# Altium footprint library ubloxLib.PcbLib: 41 footprints (part 1 of 3)
Each footprint in its own frame and in the unit in brackets; x right, y up, seen from the top. Pads: shape width x height; smd on the part's side, far side on the other; paste and mask are expansions set on the pad; w line width, h text height; cw(c..) or ccw(c..) is an arc to the next point about the centre after c.
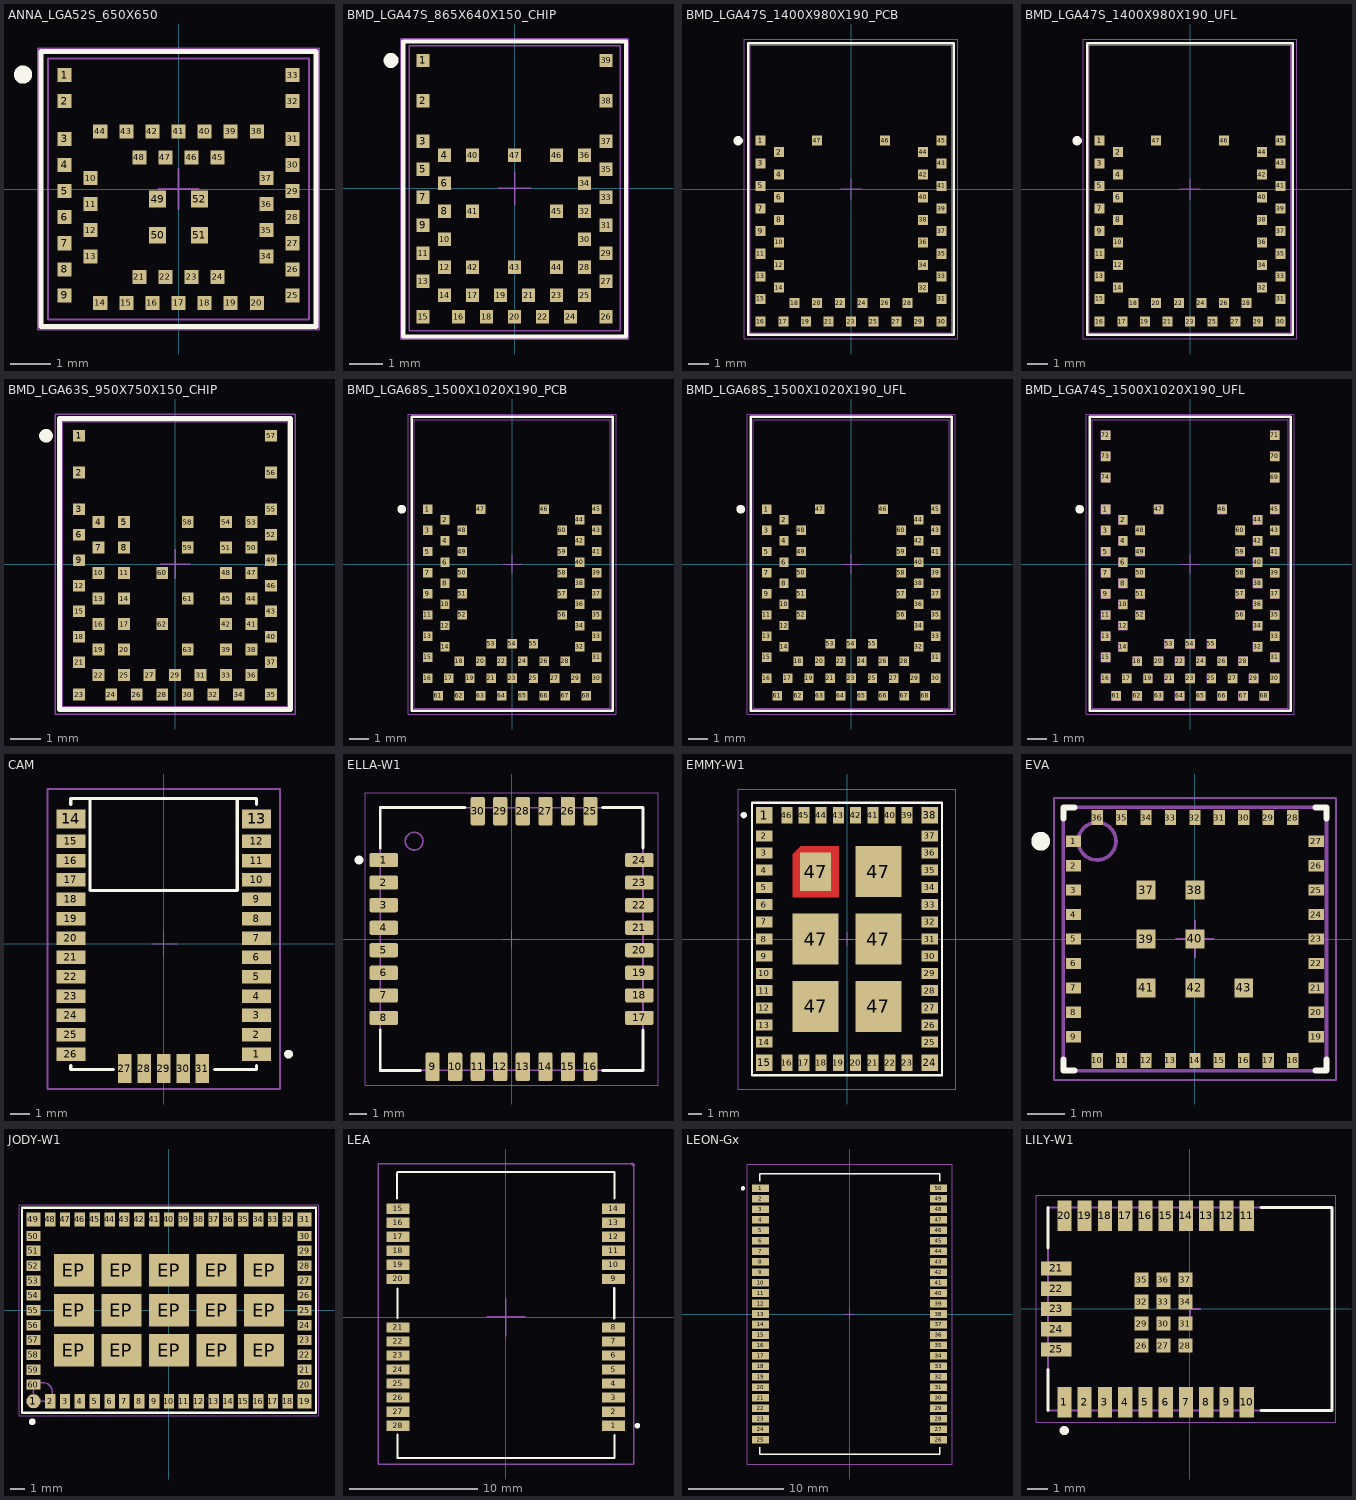
[diagram p0: the footprints below, top view; thin cyan lines are the x and y axes]

## ANNA_LGA52S_650X650 [mm]
pads (52):
  rect 0.35x0.35 smd paste+0 mask+0.05: 1(-2.84,2.84) 2(-2.84,2.19) 3(-2.84,1.248) 4(-2.84,0.598) 5(-2.84,-0.052) 6(-2.84,-0.702) 7(-2.84,-1.352) 8(-2.84,-2.002) 9(-2.84,-2.652) 10(-2.19,0.273) 11(-2.19,-0.377) 12(-2.19,-1.027) 13(-2.19,-1.677) 14(-1.95,-2.84) 15(-1.3,-2.84) 17(0,-2.84) 18(0.65,-2.84) 20(1.95,-2.84) 21(-0.975,-2.19) 23(0.325,-2.19) 24(0.975,-2.19) 25(2.84,-2.652) 26(2.84,-2.002) 27(2.84,-1.352) 28(2.84,-0.702) 29(2.84,-0.052) 30(2.84,0.598) 31(2.84,1.248) 32(2.84,2.19) 33(2.84,2.84) 34(2.19,-1.677) 35(2.19,-1.027) 36(2.19,-0.377) 37(2.19,0.273) 38(1.95,1.435) 39(1.3,1.435) 40(0.65,1.435) 41(0,1.435) 42(-0.65,1.435) 43(-1.3,1.435) 44(-1.95,1.435) 46(0.325,0.785) 48(-0.975,0.785)
  rect 0.35x0.35 smd mask+0.05: 16(-0.65,-2.84) 19(1.3,-2.84) 22(-0.325,-2.19) 45(0.975,0.785) 47(-0.325,0.785)
  rect 0.42x0.42 smd paste+0 mask+0.05: 49(-0.52,-0.252) 50(-0.52,-1.152) 51(0.52,-1.152) 52(0.52,-0.252)
Top Overlay:
  circle w0.254: c-3.875,2.85 r0.1
  lines w0.127: -3.425,-3.425 -2.825,-3.425 3.425,-3.425 3.425,3.425 -3.425,3.425 -3.425,-3.425
Mechanical 13:
  lines w0.05: -3.25,-3.25 -3.25,3.25 3.25,3.25 3.25,-3.25 -3.25,-3.25
Mechanical 15:
  lines w0.05: -0.5,0 0.5,0 ; 0,-0.5 0,0.5 ; -3.5,-3.5 3.5,-3.5 3.5,3.5 -3.5,3.5 -3.5,-3.5
  text ".Designator" at 0.1,0.433 h1
3D body "u-blox_ANNA-B1-LGA52 (STEP-AP214)_1.0.step": height 1.2, standoff 0.05, extent -3.25,-3.25 3.25,3.25

## BMD_LGA47S_865X640X150_CHIP [mm] "LGA, 47pin, 0.8mm Pitch, 8.65mm x 6.4mm"
height 1.5
pads (47):
  rect 0.4x0.4 smd: 1(-2.775,3.875) 2(-2.775,2.65) 3(-2.775,1.425) 4(-2.125,1) 5(-2.775,0.575) 6(-2.125,0.15) 7(-2.775,-0.275) 8(-2.125,-0.7) 9(-2.775,-1.125) 10(-2.125,-1.55) 11(-2.775,-1.975) 12(-2.125,-2.4) 13(-2.775,-2.825) 14(-2.125,-3.25) 15(-2.775,-3.9) 16(-1.7,-3.9) 17(-1.275,-3.25) 18(-0.85,-3.9) 19(-0.425,-3.25) 20(0,-3.9) 21(0.425,-3.25) 22(0.85,-3.9) 23(1.275,-3.25) 24(1.7,-3.9) 25(2.125,-3.25) 26(2.775,-3.9) 27(2.775,-2.825) 28(2.125,-2.4) 29(2.775,-1.975) 30(2.125,-1.55) 31(2.775,-1.125) 32(2.125,-0.7) 33(2.775,-0.275) 34(2.125,0.15) 35(2.775,0.575) 36(2.125,1) 37(2.775,1.425) 38(2.775,2.65) 39(2.775,3.875) 40(-1.275,1) 41(-1.275,-0.7) 42(-1.275,-2.4) 43(0,-2.4) 44(1.275,-2.4) 45(1.275,-0.7) 46(1.275,1) 47(0,1)
Top Overlay:
  circle w0.254: c-3.75,3.875 r0.1
  lines w0.127: -3.375,-4.5 3.375,-4.5 3.375,4.45 -3.375,4.45 -3.375,-4.5
Mechanical 13:
  lines w0.05: -3.2,-4.325 3.2,-4.325 3.2,4.325 -3.2,4.325 -3.2,-4.325
Mechanical 15:
  lines w0.05: -0.5,0 0.5,0 ; 0,-0.5 0,0.5 ; -3.45,-4.575 3.45,-4.575 3.45,4.525 -3.45,4.525 -3.45,-4.575
  text ".Designator" at 0.1,0.433 h1
Multi-Layer:
  pour cut-out: -3.2,4.325 -3.2,4.075 -2.575,4.075 -2.575,1.2 2.425,1.2 2.425,4.075 3.2,4.075 3.2,4.325
3D body "BMD-350.STEP": height 1.54, standoff 0.05, extent -3.2,-4.325 3.2,4.325

## BMD_LGA47S_1400X980X190_PCB [mm] "LGA, 47pin, 1.1mm Pitch, 14mm x 9.8mm"
height 1.9
pads (47):
  rect 0.49x0.49 smd: 1(-4.4,2.35) 2(-3.5,1.8) 3(-4.4,1.25) 4(-3.5,0.7) 5(-4.4,0.15) 6(-3.5,-0.4) 7(-4.4,-0.95) 8(-3.5,-1.5) 9(-4.4,-2.05) 10(-3.5,-2.6) 11(-4.4,-3.15) 12(-3.5,-3.7) 13(-4.4,-4.25) 14(-3.5,-4.8) 15(-4.4,-5.35) 16(-4.4,-6.45) 17(-3.3,-6.45) 18(-2.75,-5.55) 19(-2.2,-6.45) 20(-1.65,-5.55) 21(-1.1,-6.45) 22(-0.55,-5.55) 23(0,-6.45) 24(0.55,-5.55) 25(1.1,-6.45) 26(1.65,-5.55) 27(2.2,-6.45) 28(2.75,-5.55) 29(3.3,-6.45) 30(4.4,-6.45) 31(4.4,-5.35) 32(3.5,-4.8) 33(4.4,-4.25) 34(3.5,-3.7) 35(4.4,-3.15) 36(3.5,-2.6) 37(4.4,-2.05) 38(3.5,-1.5) 39(4.4,-0.95) 40(3.5,-0.4) 41(4.4,0.15) 42(3.5,0.7) 43(4.4,1.25) 44(3.5,1.8) 45(4.4,2.35) 46(1.65,2.35) 47(-1.65,2.35)
Top Overlay:
  circle w0.254: c-5.5,2.35 r0.1
  lines w0.127: -5,-7.1 5,-7.1 5,7.1 -5,7.1 -5,-7.1
Mechanical 13:
  lines w0.05: -4.9,-7 4.9,-7 4.9,7 -4.9,7 -4.9,-7
Mechanical 15:
  lines w0.05: -0.5,0 0.5,0 ; 0,-0.5 0,0.5 ; -5.2,-7.3 5.2,-7.3 5.2,7.3 -5.2,7.3 -5.2,-7.3
  text ".Designator" at 0.1,0.433 h1
Multi-Layer:
  pour cut-out: -4.9,2.6 4.9,2.6 4.9,7 -4.9,7
3D body "BMD-300-330-360.STEP": height 1.86, standoff 0.05, extent -4.9,-7 4.9,7

## BMD_LGA47S_1400X980X190_UFL [mm] "LGA, 47pin, 1.1mm Pitch, 14mm x 9.8mm"
height 1.9
pads (47):
  rect 0.49x0.49 smd: 1(-4.4,2.35) 2(-3.5,1.8) 3(-4.4,1.25) 4(-3.5,0.7) 5(-4.4,0.15) 6(-3.5,-0.4) 7(-4.4,-0.95) 8(-3.5,-1.5) 9(-4.4,-2.05) 10(-3.5,-2.6) 11(-4.4,-3.15) 12(-3.5,-3.7) 13(-4.4,-4.25) 14(-3.5,-4.8) 15(-4.4,-5.35) 16(-4.4,-6.45) 17(-3.3,-6.45) 18(-2.75,-5.55) 19(-2.2,-6.45) 20(-1.65,-5.55) 21(-1.1,-6.45) 22(-0.55,-5.55) 23(0,-6.45) 24(0.55,-5.55) 25(1.1,-6.45) 26(1.65,-5.55) 27(2.2,-6.45) 28(2.75,-5.55) 29(3.3,-6.45) 30(4.4,-6.45) 31(4.4,-5.35) 32(3.5,-4.8) 33(4.4,-4.25) 34(3.5,-3.7) 35(4.4,-3.15) 36(3.5,-2.6) 37(4.4,-2.05) 38(3.5,-1.5) 39(4.4,-0.95) 40(3.5,-0.4) 41(4.4,0.15) 42(3.5,0.7) 43(4.4,1.25) 44(3.5,1.8) 45(4.4,2.35) 46(1.65,2.35) 47(-1.65,2.35)
Top Overlay:
  circle w0.254: c-5.5,2.35 r0.1
  lines w0.127: -5,-7.1 5,-7.1 5,7.1 -5,7.1 -5,-7.1
Mechanical 13:
  lines w0.05: -4.9,-7 4.9,-7 4.9,7 -4.9,7 -4.9,-7
Mechanical 15:
  lines w0.05: -0.5,0 0.5,0 ; 0,-0.5 0,0.5 ; -5.2,-7.3 5.2,-7.3 5.2,7.3 -5.2,7.3 -5.2,-7.3
  text ".Designator" at 0.1,0.433 h1
Multi-Layer:
  pour cut-out: -4.9,2.6 4.9,2.6 4.9,7 -4.9,7
3D body "BMD-301.STEP": height 1.89, standoff 0.05, extent -4.9,-7 4.9,7

## BMD_LGA63S_950X750X150_CHIP [mm] "WLCSP, 63pin, 0.85mm Pitch, 9.5mm x 7.5mm"
height 1.5
pads (63):
  rect 0.39x0.39 smd: 1(-3.2,4.275) 2(-3.2,3.05) 3(-3.2,1.825) 4(-2.55,1.4) 5(-1.7,1.4) 6(-3.2,0.975) 7(-2.55,0.55) 8(-1.7,0.55) 9(-3.2,0.125) 10(-2.55,-0.3) 11(-1.7,-0.3) 12(-3.2,-0.725) 13(-2.55,-1.15) 14(-1.7,-1.15) 15(-3.2,-1.575) 16(-2.55,-2) 17(-1.7,-2) 18(-3.2,-2.425) 19(-2.55,-2.85) 20(-1.7,-2.85) 21(-3.2,-3.275) 22(-2.55,-3.7) 23(-3.2,-4.35) 24(-2.125,-4.35) 25(-1.7,-3.7) 26(-1.275,-4.35) 27(-0.85,-3.7) 28(-0.425,-4.35) 29(0,-3.7) 30(0.425,-4.35) 31(0.85,-3.7) 32(1.275,-4.35) 33(1.7,-3.7) 34(2.125,-4.35) 35(3.2,-4.35) 36(2.55,-3.7) 37(3.2,-3.275) 38(2.55,-2.85) 39(1.7,-2.85) 40(3.2,-2.425) 41(2.55,-2) 42(1.7,-2) 43(3.2,-1.575) 44(2.55,-1.15) 45(1.7,-1.15) 46(3.2,-0.725) 47(2.55,-0.3) 48(1.7,-0.3) 49(3.2,0.125) 50(2.55,0.55) 51(1.7,0.55) 52(3.2,0.975) 53(2.55,1.4) 54(1.7,1.4) 55(3.2,1.825) 56(3.2,3.05) 57(3.2,4.275) 58(0.425,1.4) 59(0.425,0.55) 60(-0.425,-0.3) 61(0.425,-1.15) 62(-0.425,-2) 63(0.425,-2.85)
Top Overlay:
  circle w0.254: c-4.3,4.275 r0.1
  lines w0.152: -3.85,-4.85 3.85,-4.85 3.85,4.85 -3.85,4.85 -3.85,-4.85
Mechanical 13:
  lines w0.05: -3.75,-4.75 -3.75,4.75 3.75,4.75 3.75,-4.75 -3.75,-4.75
Mechanical 15:
  lines w0.05: -0.5,0 0.5,0 ; 0,-0.5 0,0.5 ; -4,-5 -4,5 4,5 4,-5 -4,-5
  text ".Designator" at 0.1,0.433 h1
Multi-Layer:
  pour cut-out: -3.75,4.75 -3.75,4.55 -2.36,4.55 -2.36,1.65 2.79,1.65 2.79,4.55 3.75,4.55 3.75,4.75
3D body "BMD-380.STEP": height 1.53, standoff 0.05, extent -3.75,-4.75 3.75,4.75

## BMD_LGA68S_1500X1020X190_PCB [mm] "LGA, 68pin, 1.1mm Pitch, 15mm x 10.2mm"
height 1.9
pads (68):
  rect 0.49x0.49 smd: 1(-4.4,2.85) 2(-3.5,2.3) 3(-4.4,1.75) 4(-3.5,1.2) 5(-4.4,0.65) 6(-3.5,0.1) 7(-4.4,-0.45) 8(-3.5,-1) 9(-4.4,-1.55) 10(-3.5,-2.1) 11(-4.4,-2.65) 12(-3.5,-3.2) 13(-4.4,-3.75) 14(-3.5,-4.3) 15(-4.4,-4.85) 16(-4.4,-5.95) 17(-3.3,-5.95) 18(-2.75,-5.05) 19(-2.2,-5.95) 20(-1.65,-5.05) 21(-1.1,-5.95) 22(-0.55,-5.05) 23(0,-5.95) 24(0.55,-5.05) 25(1.1,-5.95) 26(1.65,-5.05) 27(2.2,-5.95) 28(2.75,-5.05) 29(3.3,-5.95) 30(4.4,-5.95) 31(4.4,-4.85) 32(3.5,-4.3) 33(4.4,-3.75) 34(3.5,-3.2) 35(4.4,-2.65) 36(3.5,-2.1) 37(4.4,-1.55) 38(3.5,-1) 39(4.4,-0.45) 40(3.5,0.1) 41(4.4,0.65) 42(3.5,1.2) 43(4.4,1.75) 44(3.5,2.3) 45(4.4,2.85) 46(1.65,2.85) 47(-1.65,2.85) 48(-2.6,1.75) 49(-2.6,0.65) 50(-2.6,-0.45) 51(-2.6,-1.55) 52(-2.6,-2.65) 53(-1.1,-4.15) 54(0,-4.15) 55(1.1,-4.15) 56(2.6,-2.65) 57(2.6,-1.55) 58(2.6,-0.45) 59(2.6,0.65) 60(2.6,1.75) 61(-3.85,-6.85) 62(-2.75,-6.85) 63(-1.65,-6.85) 64(-0.55,-6.85) 65(0.55,-6.85) 66(1.65,-6.85) 67(2.75,-6.85) 68(3.85,-6.85)
Top Overlay:
  circle w0.254: c-5.75,2.85 r0.1
  lines w0.127: -5.225,-7.625 -5.225,7.65 5.225,7.65 5.225,-7.625 -5.225,-7.625
Mechanical 13:
  lines w0.05: -5.1,-7.5 -5.1,7.5 5.1,7.5 5.1,-7.5 -5.1,-7.5
Mechanical 15:
  lines w0.05: -0.5,0 0.5,0 ; 0,-0.5 0,0.5 ; -5.4,-7.8 5.4,-7.8 5.4,7.8 -5.4,7.8 -5.4,-7.8
  text ".Designator" at 0.1,0.433 h1
Multi-Layer:
  pour cut-out: -5.1,3.1 5.1,3.1 5.1,7.5 -5.1,7.5
3D body "BMD-340.STEP": height 1.87, standoff 0.05, extent -5.1,-7.5 5.1,7.5

## BMD_LGA68S_1500X1020X190_UFL [mm] "LGA, 68pin, 1.1mm Pitch, 15mm x 10.2mm"
height 1.9
pads (68):
  rect 0.49x0.49 smd: 1(-4.4,2.85) 2(-3.5,2.3) 3(-4.4,1.75) 4(-3.5,1.2) 5(-4.4,0.65) 6(-3.5,0.1) 7(-4.4,-0.45) 8(-3.5,-1) 9(-4.4,-1.55) 10(-3.5,-2.1) 11(-4.4,-2.65) 12(-3.5,-3.2) 13(-4.4,-3.75) 14(-3.5,-4.3) 15(-4.4,-4.85) 16(-4.4,-5.95) 17(-3.3,-5.95) 18(-2.75,-5.05) 19(-2.2,-5.95) 20(-1.65,-5.05) 21(-1.1,-5.95) 22(-0.55,-5.05) 23(0,-5.95) 24(0.55,-5.05) 25(1.1,-5.95) 26(1.65,-5.05) 27(2.2,-5.95) 28(2.75,-5.05) 29(3.3,-5.95) 30(4.4,-5.95) 31(4.4,-4.85) 32(3.5,-4.3) 33(4.4,-3.75) 34(3.5,-3.2) 35(4.4,-2.65) 36(3.5,-2.1) 37(4.4,-1.55) 38(3.5,-1) 39(4.4,-0.45) 40(3.5,0.1) 41(4.4,0.65) 42(3.5,1.2) 43(4.4,1.75) 44(3.5,2.3) 45(4.4,2.85) 46(1.65,2.85) 47(-1.65,2.85) 48(-2.6,1.75) 49(-2.6,0.65) 50(-2.6,-0.45) 51(-2.6,-1.55) 52(-2.6,-2.65) 53(-1.1,-4.15) 54(0,-4.15) 55(1.1,-4.15) 56(2.6,-2.65) 57(2.6,-1.55) 58(2.6,-0.45) 59(2.6,0.65) 60(2.6,1.75) 61(-3.85,-6.85) 62(-2.75,-6.85) 63(-1.65,-6.85) 64(-0.55,-6.85) 65(0.55,-6.85) 66(1.65,-6.85) 67(2.75,-6.85) 68(3.85,-6.85)
Top Overlay:
  circle w0.254: c-5.75,2.85 r0.1
  lines w0.127: -5.225,-7.625 5.225,-7.625 5.225,7.65 -5.225,7.65 -5.225,-7.625
Mechanical 13:
  lines w0.05: -5.1,-7.5 5.1,-7.5 5.1,7.5 -5.1,7.5 -5.1,-7.5
Mechanical 15:
  lines w0.05: -0.5,0 0.5,0 ; 0,-0.5 0,0.5 ; -5.4,-7.8 -5.4,7.8 5.4,7.8 5.4,-7.8 -5.4,-7.8
  text ".Designator" at 0.1,0.433 h1
Multi-Layer:
  pour cut-out: -5.1,3.1 5.1,3.1 5.1,7.5 -5.1,7.5
3D body "BMD-341.STEP": height 1.87, standoff 0.05, extent -5.1,-7.5 5.1,7.5

## BMD_LGA74S_1500X1020X190_UFL [mm] "LGA, 68pin, 1.1mm Pitch, 15mm x 10.2mm"
height 1.9
pads (74):
  rect 0.49x0.49 smd: 1(-4.4,2.85) 2(-3.5,2.3) 3(-4.4,1.75) 4(-3.5,1.2) 5(-4.4,0.65) 6(-3.5,0.1) 7(-4.4,-0.45) 8(-3.5,-1) 9(-4.4,-1.55) 10(-3.5,-2.1) 11(-4.4,-2.65) 12(-3.5,-3.2) 13(-4.4,-3.75) 14(-3.5,-4.3) 15(-4.4,-4.85) 16(-4.4,-5.95) 17(-3.3,-5.95) 18(-2.75,-5.05) 19(-2.2,-5.95) 20(-1.65,-5.05) 21(-1.1,-5.95) 22(-0.55,-5.05) 23(0,-5.95) 24(0.55,-5.05) 25(1.1,-5.95) 26(1.65,-5.05) 27(2.2,-5.95) 28(2.75,-5.05) 29(3.3,-5.95) 30(4.4,-5.95) 31(4.4,-4.85) 32(3.5,-4.3) 33(4.4,-3.75) 34(3.5,-3.2) 35(4.4,-2.65) 36(3.5,-2.1) 37(4.4,-1.55) 38(3.5,-1) 39(4.4,-0.45) 40(3.5,0.1) 41(4.4,0.65) 42(3.5,1.2) 43(4.4,1.75) 44(3.5,2.3) 45(4.4,2.85) 46(1.65,2.85) 47(-1.65,2.85) 48(-2.6,1.75) 49(-2.6,0.65) 50(-2.6,-0.45) 51(-2.6,-1.55) 52(-2.6,-2.65) 53(-1.1,-4.15) 54(0,-4.15) 55(1.1,-4.15) 56(2.6,-2.65) 57(2.6,-1.55) 58(2.6,-0.45) 59(2.6,0.65) 60(2.6,1.75) 61(-3.85,-6.85) 62(-2.75,-6.85) 63(-1.65,-6.85) 64(-0.55,-6.85) 65(0.55,-6.85) 66(1.65,-6.85) 67(2.75,-6.85) 68(3.85,-6.85)
  rect 0.5x0.5 smd: 69(4.4,4.5) 70(4.4,5.6) 71(4.4,6.7) 72(-4.4,6.7) 73(-4.4,5.6) 74(-4.4,4.5)
Top Overlay:
  circle w0.254: c-5.75,2.85 r0.1
  lines w0.127: -5.225,-7.625 5.225,-7.625 5.225,7.65 -5.225,7.65 -5.225,-7.625
Mechanical 13:
  lines w0.05: -5.1,-7.5 5.1,-7.5 5.1,7.5 -5.1,7.5 -5.1,-7.5
Mechanical 14:
  drawing of 296 lines, arcs and shapes, not listed
Mechanical 15:
  lines w0.05: -0.5,0 0.5,0 ; 0,-0.5 0,0.5 ; -5.4,-7.8 5.4,-7.8 5.4,7.8 -5.4,7.8 -5.4,-7.8
  text ".Designator" at 0.1,0.433 h1
Multi-Layer:
  pour cut-out: -5.1,3.1 5.1,3.1 5.1,7.5 -5.1,7.5
3D body "BMD-345.STEP": height 2.03, standoff 0.05, extent -5.1,-7.5 5.1,7.5

## CAM [mm] "u-blox CAM GNSS antenna module"
pads (31):
  rect 1.5x0.7 smd: 1(4.8,-5.7) 2(4.8,-4.7) 3(4.8,-3.7) 4(4.8,-2.7) 5(4.8,-1.7) 6(4.8,-0.7) 7(4.8,0.3) 8(4.8,1.3) 9(4.8,2.3) 10(4.8,3.3) 11(4.8,4.3) 12(4.8,5.3) 15(-4.8,5.3) 16(-4.8,4.3) 17(-4.8,3.3) 18(-4.8,2.3) 19(-4.8,1.3) 20(-4.8,0.3) 21(-4.8,-0.7) 22(-4.8,-1.7) 23(-4.8,-2.7) 24(-4.8,-3.7) 25(-4.8,-4.7) 26(-4.8,-5.7)
  rect 1.5x1 smd: 13(4.8,6.45) 14(-4.8,6.45)
  rect 0.7x1.5 smd: 27(-2,-6.45) 28(-1,-6.45) 29(0,-6.45) 30(1,-6.45) 31(2,-6.45)
Top Overlay:
  circle w0.254: c6.45,-5.7 r0.1
  lines w0.16: -4.8,-6.3 -4.8,-6.5 -2.6,-6.5 ; -4.8,7.2 -4.8,7.5 4.8,7.5 4.8,7.2 ; -3.8,7.5 -3.8,2.75 3.8,2.75 3.8,7.5 ; 2.63,-6.5 4.45,-6.5 4.8,-6.5 4.8,-6.3
Mechanical 15:
  lines w0.05: -0.619,-0.003 -0.001,-0.003 ; -0.001,-0.615 -0.001,-0.003 ; -0.001,0.662 -0.001,-0.003 ; 0.696,-0.003 -0.001,-0.003
  lines w0.1: -6,-7.5 6,-7.5 6,8 -6,8 -6,-7.5
  text ".Designator" at 0.099,0.43 h1
Multi-Layer:
  pour cut-out: -3.8,7.5 -3.8,2.75 3.8,2.75 3.8,7.5
3D body "CAM (STEP-AP214).STEP": height 1.97, standoff -0.04, extent -4.8,-6.5 4.8,7.5

## ELLA-W1 [mm] "IEEE 802.11a/b/g/n Wi-Fi, Bluetooth 3.0+HS Module"
height 2
pads (30):
  rrect25% 1.6x0.8 smd: 1(-7.2,4.445) 2(-7.2,3.175) 3(-7.2,1.905) 4(-7.2,0.635) 5(-7.2,-0.635) 6(-7.2,-1.905) 7(-7.2,-3.175) 8(-7.2,-4.445) 17(7.2,-4.445) 18(7.2,-3.175) 19(7.2,-1.905) 20(7.2,-0.635) 21(7.2,0.635) 22(7.2,1.905) 23(7.2,3.175) 24(7.2,4.445)
  rrect25% 0.8x1.6 smd: 9(-4.445,-7.2) 10(-3.175,-7.2) 11(-1.905,-7.2) 12(-0.635,-7.2) 13(0.635,-7.2) 14(1.905,-7.2) 15(3.175,-7.2) 16(4.445,-7.2) 25(4.445,7.2) 26(3.175,7.2) 27(1.905,7.2) 28(0.635,7.2) 29(-0.635,7.2) 30(-1.905,7.2)
Top Overlay:
  circle w0.4: c-8.6,4.45 r0.05
  lines w0.16: -7.4,-5.125 -7.4,-7.4 -5.125,-7.4 ; -7.4,5.125 -7.4,7.4 -2.625,7.4 ; 5.125,-7.4 7.4,-7.4 7.4,-5.125 ; 5.125,7.4 7.4,7.4 7.4,5.125
Mechanical 13:
  circle w0.1: c-5.489,5.512 r0.499
  lines w0.1: -7.4,4.695 -7.4,7.4 -2.155,7.4 ccw(c-1.905,7.4) -1.655,7.4 -0.885,7.4 ccw(c-0.635,7.4) -0.385,7.4 0.385,7.4 ccw(c0.635,7.4) 0.885,7.4 1.655,7.4 ccw(c1.905,7.4) 2.155,7.4 2.925,7.4 ccw(c3.175,7.4) 3.425,7.4 4.195,7.4 ccw(c4.445,7.4) 4.695,7.4 ; -7.4,4.695 cw(c-7.4,4.445) -7.4,4.195 -7.4,3.425 cw(c-7.4,3.175) -7.4,2.925 -7.4,2.155 cw(c-7.4,1.905) -7.4,1.655 -7.4,0.885 cw(c-7.4,0.635) -7.4,0.385 -7.4,-0.385 cw(c-7.4,-0.635) -7.4,-0.885 -7.4,-1.655 cw(c-7.4,-1.905) -7.4,-2.155 -7.4,-2.925 cw(c-7.4,-3.175) -7.4,-3.425 -7.4,-4.195 cw(c-7.4,-4.445) -7.4,-4.695 -7.4,-7.4 -4.695,-7.4 cw(c-4.445,-7.4) -4.195,-7.4 -3.425,-7.4 cw(c-3.175,-7.4) -2.925,-7.4 -2.155,-7.4 cw(c-1.905,-7.4) -1.655,-7.4 -0.885,-7.4 cw(c-0.635,-7.4) -0.385,-7.4 0.385,-7.4 cw(c0.635,-7.4) 0.885,-7.4 1.655,-7.4 cw(c1.905,-7.4) 2.155,-7.4 2.925,-7.4 cw(c3.175,-7.4) 3.425,-7.4 4.195,-7.4 cw(c4.445,-7.4) 4.695,-7.4 7.4,-7.4 7.4,-4.695 ; 4.694,7.4 7.4,7.4 7.4,4.695 ccw(c7.4,4.445) 7.4,4.195 7.4,3.425 ccw(c7.4,3.175) 7.4,2.925 7.4,2.155 ccw(c7.4,1.905) 7.4,1.655 7.4,0.885 ccw(c7.4,0.635) 7.4,0.385 7.4,-0.385 ccw(c7.4,-0.635) 7.4,-0.885 7.4,-1.655 ccw(c7.4,-1.905) 7.4,-2.155 7.4,-2.925 ccw(c7.4,-3.175) 7.4,-3.425 7.4,-4.195 ccw(c7.4,-4.445) 7.4,-4.695
Mechanical 15:
  lines w0.05: -0.5,0 0.5,0 ; 0,-0.5 0,0.5 ; -8.25,-8.25 -8.25,8.25 8.25,8.25 8.25,-8.25 -8.25,-8.25
  text ".Designator" at 0.1,0.433 h1
3D body: height 2.5, standoff 2.35, extent -7.2,-7.2 7.199,7.2
3D body: height 2.51, standoff 2.5, extent -5.999,5.01 -5.001,6.009
3D body: height 0.87, standoff 0.85, extent -7.3,6.1 -6.1,7.3
3D body: height 2.35, standoff 0.87, extent -7.1,6.2 -6.2,7.1
3D body: height 2.35, standoff 1.1, extent -6.15,7.05 6.15,7.2
3D body: height 2.35, standoff 0.87, extent 6.199,6.2 7.099,7.1
3D body: height 0.87, standoff 0.85, extent 6.099,6.1 7.299,7.3
3D body: height 2.35, standoff 0.87, extent 6.2,-7.1 7.1,-6.2
3D body: height 0.87, standoff 0.85, extent 6.1,-7.3 7.3,-6.1
3D body: height 2.35, standoff 0.87, extent -7.1,-7.1 -6.2,-6.2
3D body: height 0.87, standoff 0.85, extent -7.3,-7.3 -6.1,-6.1
3D body: height 2.35, standoff 1.1, extent -6.15,-7.2 6.15,-7.05
3D body: height 2.35, standoff 1.1, extent -7.2,-6.15 -7.05,6.15
3D body: height 2.35, standoff 1.1, extent 7.049,-6.15 7.199,6.15
3D body: height 0.85, standoff 0, extent -7.4,-7.4 7.4,7.4
3D body: height 0.87, standoff 0, extent -7.4,4.17 -7.125,4.72
3D body: height 0.87, standoff 0.85, extent -7.4,4.02 -6.975,4.87
3D body: height 0.87, standoff 0, extent -7.4,2.9 -7.125,3.45
3D body: height 0.87, standoff 0.85, extent -7.4,2.75 -6.975,3.6
3D body: height 0.87, standoff 0, extent -7.4,1.63 -7.125,2.18
3D body: height 0.87, standoff 0.85, extent -7.4,1.48 -6.975,2.33
3D body: height 0.87, standoff 0, extent -7.4,0.36 -7.125,0.91
3D body: height 0.87, standoff 0.85, extent -7.4,0.21 -6.975,1.06
3D body: height 0.87, standoff 0, extent -7.4,-0.91 -7.125,-0.36
3D body: height 0.87, standoff 0.85, extent -7.4,-1.06 -6.975,-0.21
3D body: height 0.87, standoff 0, extent -7.4,-2.18 -7.125,-1.63
3D body: height 0.87, standoff 0.85, extent -7.4,-2.33 -6.975,-1.48
3D body: height 0.87, standoff 0, extent -7.4,-3.45 -7.125,-2.9
3D body: height 0.87, standoff 0.85, extent -7.4,-3.6 -6.975,-2.75
3D body: height 0.87, standoff 0, extent -7.4,-4.72 -7.125,-4.17
3D body: height 0.87, standoff 0.85, extent -7.4,-4.87 -6.975,-4.02
3D body: height 0.87, standoff 0.85, extent 4.02,-7.4 4.87,-6.975
3D body: height 0.87, standoff 0, extent 4.17,-7.4 4.72,-7.125
3D body: height 0.87, standoff 0.85, extent 2.75,-7.4 3.6,-6.975
3D body: height 0.87, standoff 0, extent 2.9,-7.4 3.45,-7.125
3D body: height 0.87, standoff 0.85, extent 1.48,-7.4 2.33,-6.975
3D body: height 0.87, standoff 0, extent 1.63,-7.4 2.18,-7.125
3D body: height 0.87, standoff 0.85, extent 0.21,-7.4 1.06,-6.975
3D body: height 0.87, standoff 0, extent 0.36,-7.4 0.91,-7.125
3D body: height 0.87, standoff 0.85, extent -1.06,-7.4 -0.21,-6.975
3D body: height 0.87, standoff 0, extent -0.91,-7.4 -0.36,-7.125
3D body: height 0.87, standoff 0.85, extent -2.33,-7.4 -1.48,-6.975
3D body: height 0.87, standoff 0, extent -2.18,-7.4 -1.63,-7.125
3D body: height 0.87, standoff 0.85, extent -3.6,-7.4 -2.75,-6.975
3D body: height 0.87, standoff 0, extent -3.45,-7.4 -2.9,-7.125
3D body: height 0.87, standoff 0.85, extent -4.87,-7.4 -4.02,-6.975
3D body: height 0.87, standoff 0, extent -4.72,-7.4 -4.17,-7.125
3D body: height 0.87, standoff 0.85, extent 6.975,4.02 7.4,4.87
3D body: height 0.87, standoff 0, extent 7.125,4.17 7.4,4.72
3D body: height 0.87, standoff 0.85, extent 6.975,2.75 7.4,3.6
3D body: height 0.87, standoff 0, extent 7.125,2.9 7.4,3.45
3D body: height 0.87, standoff 0.85, extent 6.975,1.48 7.4,2.33
3D body: height 0.87, standoff 0, extent 7.125,1.63 7.4,2.18
3D body: height 0.87, standoff 0.85, extent 6.975,0.21 7.4,1.06
3D body: height 0.87, standoff 0, extent 7.125,0.36 7.4,0.91
3D body: height 0.87, standoff 0.85, extent 6.975,-1.06 7.4,-0.21
3D body: height 0.87, standoff 0, extent 7.125,-0.91 7.4,-0.36
3D body: height 0.87, standoff 0.85, extent 6.975,-2.33 7.4,-1.48
3D body: height 0.87, standoff 0, extent 7.125,-2.18 7.4,-1.63
3D body: height 0.87, standoff 0.85, extent 6.975,-3.6 7.4,-2.75
3D body: height 0.87, standoff 0, extent 7.125,-3.45 7.4,-2.9
3D body: height 0.87, standoff 0.85, extent 6.975,-4.87 7.4,-4.02
3D body: height 0.87, standoff 0, extent 7.125,-4.72 7.4,-4.17
3D body: height 0.87, standoff 0.85, extent -2.33,6.975 -1.48,7.4
3D body: height 0.87, standoff 0, extent -2.18,7.125 -1.63,7.4
3D body: height 0.87, standoff 0.85, extent -1.06,6.975 -0.21,7.4
3D body: height 0.87, standoff 0, extent -0.91,7.125 -0.36,7.4
3D body: height 0.87, standoff 0.85, extent 0.21,6.975 1.06,7.4
3D body: height 0.87, standoff 0, extent 0.36,7.125 0.91,7.4
3D body: height 0.87, standoff 0.85, extent 1.48,6.975 2.33,7.4
3D body: height 0.87, standoff 0, extent 1.63,7.125 2.18,7.4
3D body: height 0.87, standoff 0.85, extent 2.75,6.975 3.6,7.4
3D body: height 0.87, standoff 0, extent 2.9,7.125 3.45,7.4
3D body: height 0.87, standoff 0.85, extent 4.02,6.975 4.87,7.4
3D body: height 0.87, standoff 0, extent 4.17,7.125 4.72,7.4

## EMMY-W1 [mm] "Host-based multiradio module with Wi-Fi, Bluetooth and NFC"
height 2.5
pads (52):
  rect 1.2x1.2 smd: 1(-6,9) 15(-6,-9) 24(6,-9) 38(6,9)
  rect 1.2x0.8 smd: 2(-6,7.5) 3(-6,6.25) 4(-6,5) 5(-6,3.75) 6(-6,2.5) 7(-6,1.25) 8(-6,0) 9(-6,-1.25) 10(-6,-2.5) 11(-6,-3.75) 12(-6,-5) 13(-6,-6.25) 14(-6,-7.5) 25(6,-7.5) 26(6,-6.25) 27(6,-5) 28(6,-3.75) 29(6,-2.5) 30(6,-1.25) 31(6,0) 32(6,1.25) 33(6,2.5) 34(6,3.75) 35(6,5) 36(6,6.25) 37(6,7.5)
  rect 0.8x1.2 smd: 16(-4.375,-9) 17(-3.125,-9) 18(-1.875,-9) 19(-0.625,-9) 20(0.625,-9) 21(1.875,-9) 22(3.125,-9) 23(4.375,-9) 39(4.375,9) 40(3.125,9) 41(1.875,9) 42(0.625,9) 43(-0.625,9) 44(-1.875,9) 45(-3.125,9) 46(-4.375,9)
  rect 3.35x3.7 smd paste-10: 47(-2.275,-4.9) 47(-2.275,0) 47(2.275,-4.9) 47(2.275,0) 47(2.275,4.9)
  rect 2.25x2.8 smd paste-10: 47(-2.275,4.9)
Top Layer:
  region: -3.95,3.05 -0.6,3.05 -0.6,6.75 -3.35,6.75 -3.95,6.15
Top Overlay:
  circle w0.254: c-7.5,9 r0.1
  lines w0.15: -6.9,-9.9 -6.9,9.9 6.9,9.9 6.9,-9.9 -6.9,-9.9
Top Paste:
  drawing of 54 lines, arcs and shapes, not listed
Top Solder:
  region: -4.075,2.95 -0.5,2.95 -0.5,6.85 -3.425,6.85 -4.075,6.2
Mechanical 13:
  lines w0.1: -6.9,-9.9 -6.9,9.9 6.9,9.9 6.9,-9.9 -6.9,-9.9
Mechanical 15:
  lines w0.05: -0.5,0 0.5,0 ; 0,-0.5 0,0.5 ; -7.9,-10.9 -7.9,10.9 7.9,10.9 7.9,-10.9 -7.9,-10.9
  text ".Designator" at 0.1,0.433 h1
3D body: height 3, standoff 0, extent -6.925,-9.9 6.925,9.9

## EVA [mm] "u-blox EVA GNSS module"
height 1.16
pads (43):
  rect 0.4x0.3 smd: 1(-3.225,2.6) 2(-3.225,1.95) 3(-3.225,1.3) 4(-3.225,0.65) 5(-3.225,0) 6(-3.225,-0.65) 7(-3.225,-1.3) 8(-3.225,-1.95) 9(-3.225,-2.6) 19(3.225,-2.6) 20(3.225,-1.95) 21(3.225,-1.3) 22(3.225,-0.65) 23(3.225,0) 24(3.225,0.65) 25(3.225,1.3) 26(3.225,1.95) 27(3.225,2.6)
  rect 0.3x0.4 smd: 10(-2.6,-3.225) 11(-1.95,-3.225) 12(-1.3,-3.225) 13(-0.65,-3.225) 14(0,-3.225) 15(0.65,-3.225) 16(1.3,-3.225) 17(1.95,-3.225) 18(2.6,-3.225) 28(2.6,3.225) 29(1.95,3.225) 30(1.3,3.225) 31(0.65,3.225) 32(0,3.225) 33(-0.65,3.225) 34(-1.3,3.225) 35(-1.95,3.225) 36(-2.6,3.225)
  rect 0.5x0.5 smd paste+0: 37(-1.3,1.3) 38(0,1.3) 39(-1.3,0) 40(0,0) 41(-1.3,-1.3) 42(0,-1.3) 43(1.3,-1.3)
Top Overlay:
  circle w0.25: c-4.1,2.6 r0.125
  lines w0.16: -3.5,-3.2 -3.5,-3.5 -3.2,-3.5 ; -3.5,3.2 -3.5,3.5 -3.2,3.5 ; 3.2,-3.5 3.5,-3.5 3.5,-3.2 ; 3.2,3.5 3.5,3.5 3.5,3.2
Mechanical 13:
  circle w0.1: c-2.6,2.6 r0.5
  lines w0.1: -3.5,-3.5 3.5,-3.5 3.5,3.5 -3.5,3.5 -3.5,-3.5
Mechanical 15:
  lines w0.05: -0.5,0 0.5,0 ; 0,-0.5 0,0.5 ; -3.75,-3.75 3.75,-3.75 3.75,3.75 -3.75,3.75 -3.75,-3.75
  text ".Designator" at 0.1,0.433 h1
3D body "EVA-43 (STEP-AP214).STEP": height 1.07, standoff 0.01, extent -3.499,-3.499 3.501,3.501

## JODY-W1 [mm] "Host-based modules with Wi-Fi and dual-mode Bluetooth"
height 2.5
pads (75):
  round 0.95 smd: 1(-9.125,-6.125)
  rect 0.7x0.95 smd: 2(-8,-6.125) 3(-7,-6.125) 4(-6,-6.125) 5(-5,-6.125) 6(-4,-6.125) 7(-3,-6.125) 8(-2,-6.125) 9(-1,-6.125) 10(0,-6.125) 12(2,-6.125) 13(3,-6.125) 14(4,-6.125) 15(5,-6.125) 17(7,-6.125) 18(8,-6.125) 32(8,6.125) 33(7,6.125) 34(6,6.125) 35(5,6.125) 36(4,6.125) 37(3,6.125) 38(2,6.125) 39(1,6.125) 40(0,6.125) 41(-1,6.125) 42(-2,6.125) 43(-3,6.125) 44(-4,6.125) 45(-5,6.125) 46(-6,6.125) 47(-7,6.125) 48(-8,6.125)
  rect 0.7x0.95 smd paste+0: 11(1,-6.125) 16(6,-6.125)
  rect 0.95x0.95 smd: 19(9.125,-6.125) 31(9.125,6.125) 49(-9.125,6.125)
  rect 0.95x0.7 smd: 20(9.125,-5) 21(9.125,-4) 22(9.125,-3) 23(9.125,-2) 24(9.125,-1) 25(9.125,0) 26(9.125,1) 27(9.125,2) 28(9.125,3) 29(9.125,4) 30(9.125,5) 50(-9.125,5) 51(-9.125,4) 52(-9.125,3) 53(-9.125,2) 54(-9.125,1) 55(-9.125,0) 56(-9.125,-1) 57(-9.125,-2) 58(-9.125,-3) 59(-9.125,-4) 60(-9.125,-5)
  rect 2.7x2.2 smd paste-10: EP(-6.4,-2.7) EP(-6.4,0) EP(-6.4,2.7) EP(-3.2,-2.7) EP(-3.2,2.7) EP(-3.2,0) EP(0,-2.7) EP(0,0) EP(0,2.7) EP(3.2,-2.7) EP(3.2,0) EP(3.2,2.7) EP(6.4,2.7) EP(6.4,-2.7) EP(6.4,0)
Top Overlay:
  circle w0.254: c-9.2,-7.5 r0.1
  lines w0.15: -9.9,-6.9 9.9,-6.9 9.9,6.9 -9.9,6.9 -9.9,-6.9
Top Paste:
  rectangle: -6.275,1.775 -5.275,2.575
  rectangle: -7.525,1.775 -6.525,2.575
  rectangle: -6.275,2.825 -5.275,3.625
  rectangle: -7.525,2.825 -6.525,3.625
  rectangle: -3.075,1.775 -2.075,2.575
  rectangle: -4.325,1.775 -3.325,2.575
  rectangle: -3.075,2.825 -2.075,3.625
  rectangle: -4.325,2.825 -3.325,3.625
  rectangle: 0.125,1.775 1.125,2.575
  rectangle: -1.125,1.775 -0.125,2.575
  rectangle: 0.125,2.825 1.125,3.625
  rectangle: -1.125,2.825 -0.125,3.625
  rectangle: 3.325,1.775 4.325,2.575
  rectangle: 2.075,1.775 3.075,2.575
  rectangle: 3.325,2.825 4.325,3.625
  rectangle: 2.075,2.825 3.075,3.625
  rectangle: 6.525,1.775 7.525,2.575
  rectangle: 5.275,1.775 6.275,2.575
  rectangle: 6.525,2.825 7.525,3.625
  rectangle: 5.275,2.825 6.275,3.625
  rectangle: 6.525,-0.925 7.525,-0.125
  rectangle: 5.275,-0.925 6.275,-0.125
  rectangle: 6.525,0.125 7.525,0.925
  rectangle: 5.275,0.125 6.275,0.925
  rectangle: 6.525,-3.625 7.525,-2.825
  rectangle: 5.275,-3.625 6.275,-2.825
  rectangle: 6.525,-2.575 7.525,-1.775
  rectangle: 5.275,-2.575 6.275,-1.775
  rectangle: 3.325,-3.625 4.325,-2.825
  rectangle: 2.075,-3.625 3.075,-2.825
  rectangle: 3.325,-2.575 4.325,-1.775
  rectangle: 2.075,-2.575 3.075,-1.775
  rectangle: 3.325,-0.925 4.325,-0.125
  rectangle: 2.075,-0.925 3.075,-0.125
  rectangle: 3.325,0.125 4.325,0.925
  rectangle: 2.075,0.125 3.075,0.925
  rectangle: 0.125,-0.925 1.125,-0.125
  rectangle: -1.125,-0.925 -0.125,-0.125
  rectangle: 0.125,0.125 1.125,0.925
  rectangle: -1.125,0.125 -0.125,0.925
  rectangle: 0.125,-3.625 1.125,-2.825
  rectangle: -1.125,-3.625 -0.125,-2.825
  rectangle: 0.125,-2.575 1.125,-1.775
  rectangle: -1.125,-2.575 -0.125,-1.775
  rectangle: -3.075,-0.925 -2.075,-0.125
  rectangle: -4.325,-0.925 -3.325,-0.125
  rectangle: -3.075,0.125 -2.075,0.925
  rectangle: -4.325,0.125 -3.325,0.925
  rectangle: -3.075,-3.625 -2.075,-2.825
  rectangle: -4.325,-3.625 -3.325,-2.825
  rectangle: -3.075,-2.575 -2.075,-1.775
  rectangle: -4.325,-2.575 -3.325,-1.775
  rectangle: -6.275,-0.925 -5.275,-0.125
  rectangle: -7.525,-0.925 -6.525,-0.125
  rectangle: -6.275,0.125 -5.275,0.925
  rectangle: -7.525,0.125 -6.525,0.925
  rectangle: -6.275,-3.625 -5.275,-2.825
  rectangle: -7.525,-3.625 -6.525,-2.825
  rectangle: -6.275,-2.575 -5.275,-1.775
  rectangle: -7.525,-2.575 -6.525,-1.775
Mechanical 13:
  circle w0.1: c-8.5,-5.5 r0.632
  lines w0.1: -9.9,-6.9 9.9,-6.9 9.9,6.9 -9.9,6.9 -9.9,-6.9
Mechanical 15:
  lines w0.05: -10.1,-7.1 10.1,-7.1 10.1,7.1 -10.1,7.1 -10.1,-7.1
  lines w0.1: -1,0 1,0 ; 0,-1 0,1
  text ".Designator" at 0.1,0.433 h1
3D body "JODY.STEP": height 2.43, standoff 0.02, extent -9.9,-6.9 9.9,6.9

## LEA [mm] "u-blox LEA GNSS module"
pads (28):
  rect 1.8x0.8 smd paste-4: 1(8.445,-8.5)
  rect 1.8x0.8 smd paste-0.4 mask+0.102: 2(8.445,-7.4) 3(8.445,-6.3) 4(8.445,-5.2) 5(8.445,-4.1) 6(8.445,-3) 7(8.445,-1.9) 8(8.445,-0.8) 9(8.445,3) 10(8.445,4.1) 11(8.445,5.2) 12(8.445,6.3) 13(8.445,7.4) 14(8.445,8.5) 16(-8.445,7.4) 17(-8.445,6.3) 18(-8.445,5.2) 19(-8.445,4.1) 20(-8.445,3) 21(-8.445,-0.8) 22(-8.445,-1.9) 23(-8.445,-3) 24(-8.445,-4.1) 25(-8.445,-5.2) 26(-8.445,-6.3) 27(-8.445,-7.4) 28(-8.445,-8.5)
  rect 1.8x0.8 smd paste-0.4: 15(-8.445,8.5)
Top Overlay:
  circle w0.38: c10.3,-8.5 r0.026
  lines w0.16: -8.514,9.28 -8.514,11.344 -8.495,11.363 8.497,11.363 8.497,9.28 ; -8.508,-0.08 -8.508,2.238 ; -8.501,-9.198 -8.501,-11.027 -8.489,-11.04 8.485,-11.04 8.497,-11.027 8.497,-9.237 ; 8.485,-0.093 8.485,2.276
Top Paste:
  rectangle: 8.496,-8.9 9.596,-8.1
  rectangle: 8.496,-7.8 9.596,-7
  rectangle: 8.496,-6.7 9.596,-5.9
  rectangle: 8.496,-5.6 9.596,-4.8
  rectangle: 8.496,-4.5 9.596,-3.7
  rectangle: 8.496,-3.4 9.596,-2.6
  rectangle: 8.496,-2.3 9.596,-1.5
  rectangle: 8.496,-1.2 9.596,-0.4
  rectangle: 8.495,2.6 9.596,3.4
  rectangle: 8.495,3.7 9.596,4.5
  rectangle: 8.495,5.9 9.596,6.7
  rectangle: 8.495,7 9.596,7.8
  rectangle: 8.495,8.1 9.596,8.9
  rectangle: 8.495,4.8 9.596,5.6
  rectangle: 7.845,-8.8 8.495,-8.2
  rectangle: 7.845,-6.6 8.495,-6
  rectangle: 7.845,-5.5 8.495,-4.9
  rectangle: 7.845,-4.4 8.495,-3.8
  rectangle: 7.845,-3.3 8.495,-2.7
  rectangle: 7.845,-2.2 8.495,-1.6
  rectangle: 7.845,-1.1 8.495,-0.5
  rectangle: 7.845,2.7 8.495,3.3
  rectangle: 7.845,3.8 8.495,4.4
  rectangle: 7.845,4.9 8.495,5.5
  rectangle: 7.845,6 8.495,6.6
  rectangle: 7.845,8.2 8.495,8.8
  rectangle: 7.845,7.1 8.495,7.7
  rectangle: 7.845,-7.7 8.495,-7.1
  rectangle: -9.604,4.8 -8.504,5.6
  rectangle: -9.604,8.1 -8.504,8.9
  rectangle: -9.604,7 -8.504,7.8
  rectangle: -9.604,5.9 -8.504,6.7
  rectangle: -9.604,3.7 -8.504,4.5
  rectangle: -9.604,2.6 -8.504,3.4
  rectangle: -8.504,7.1 -7.854,7.7
  rectangle: -8.504,8.2 -7.854,8.8
  rectangle: -8.504,6 -7.854,6.6
  rectangle: -8.504,4.9 -7.854,5.5
  rectangle: -8.504,3.8 -7.854,4.4
  rectangle: -8.504,2.7 -7.854,3.3
  rectangle: -9.604,-1.2 -8.504,-0.4
  rectangle: -9.604,-2.3 -8.504,-1.5
  rectangle: -9.604,-3.4 -8.504,-2.6
  rectangle: -9.604,-4.5 -8.504,-3.7
  rectangle: -9.604,-5.6 -8.504,-4.8
  rectangle: -9.604,-6.7 -8.504,-5.9
  rectangle: -9.604,-7.8 -8.504,-7
  rectangle: -9.604,-8.9 -8.504,-8.1
  rectangle: -8.505,-7.7 -7.855,-7.1
  rectangle: -8.505,-1.1 -7.855,-0.5
  rectangle: -8.505,-2.2 -7.855,-1.6
  rectangle: -8.505,-3.3 -7.855,-2.7
  rectangle: -8.505,-4.4 -7.855,-3.8
  rectangle: -8.505,-5.5 -7.855,-4.9
  rectangle: -8.505,-6.6 -7.855,-6
  rectangle: -8.505,-8.8 -7.855,-8.2
Mechanical 15:
  lines w0.1: -1.5,0.019 -0.001,0.019 ; -0.001,-1.5 -0.001,0.019 ; -0.001,1.464 -0.001,0.019 ; 1.5,0.019 -0.001,0.019 ; 9.9,12 -10,12 -10,-11.5 10,-11.5 10,11.9
  lines w0.254: 9.9,12 10,11.9
  text ".Designator" at 0.099,0.452 h1
3D body "LEA ( STEP-AP214).STEP": height 2.35, standoff -0.05, extent -8.502,-11.015 8.498,11.385

## LEON-Gx [mm] "quad-band GSM/GPRS data & voice module"
height 3.3
pads (50):
  rrect5% 1.8x0.8 smd paste-1: 1(-9.35,13.2) 2(-9.35,12.1) 3(-9.35,11) 4(-9.35,9.9) 5(-9.35,8.8) 6(-9.35,7.7) 7(-9.35,6.6) 8(-9.35,5.5) 9(-9.35,4.4) 10(-9.35,3.3) 11(-9.35,2.2) 12(-9.35,1.1) 13(-9.35,0) 14(-9.35,-1.1) 15(-9.35,-2.2) 16(-9.35,-3.3) 17(-9.35,-4.4) 18(-9.35,-5.5) 19(-9.35,-6.6) 20(-9.35,-7.7) 21(-9.35,-8.8) 22(-9.35,-9.9) 23(-9.35,-11) 24(-9.35,-12.1) 25(-9.35,-13.2) 26(9.35,-13.2) 27(9.35,-12.1) 28(9.35,-11) 29(9.35,-9.9) 30(9.35,-8.8) 31(9.35,-7.7) 32(9.35,-6.6) 33(9.35,-5.5) 34(9.35,-4.4) 35(9.35,-3.3) 36(9.35,-2.2) 37(9.35,-1.1) 38(9.35,0) 39(9.35,1.1) 40(9.35,2.2) 41(9.35,3.3) 42(9.35,4.4) 43(9.35,5.5) 44(9.35,6.6) 45(9.35,7.7) 46(9.35,8.8) 47(9.35,9.9) 48(9.35,11) 49(9.35,12.1) 50(9.35,13.2)
Top Overlay:
  circle w0.254: c-11.2,13.2 r0.1
  lines w0.15: -9.45,-14 -9.45,-14.75 9.45,-14.75 9.45,-14 ; -9.45,13.95 -9.45,14.75 9.45,14.75 9.45,13.95
Top Paste:
  rectangle: 8.55,12.9 9.45,13.5
  rectangle: 8.55,11.8 9.45,12.4
  rectangle: 8.55,9.6 9.45,10.2
  rectangle: 8.55,10.7 9.45,11.3
  rectangle: 8.55,8.5 9.45,9.1
  rectangle: 8.55,7.4 9.45,8
  rectangle: 8.55,5.2 9.45,5.8
  rectangle: 8.55,6.3 9.45,6.9
  rectangle: 8.55,4.1 9.45,4.7
  rectangle: 8.55,3 9.45,3.6
  rectangle: 8.55,0.8 9.45,1.4
  rectangle: 8.55,1.9 9.45,2.5
  rectangle: 8.55,-0.3 9.45,0.3
  rectangle: 8.55,-1.4 9.45,-0.8
  rectangle: 8.55,-3.6 9.45,-3
  rectangle: 8.55,-2.5 9.45,-1.9
  rectangle: 8.55,-4.7 9.45,-4.1
  rectangle: 8.55,-5.8 9.45,-5.2
  rectangle: 8.55,-8 9.45,-7.4
  rectangle: 8.55,-6.9 9.45,-6.3
  rectangle: 8.55,-9.1 9.45,-8.5
  rectangle: 8.55,-10.2 9.45,-9.6
  rectangle: 8.55,-12.4 9.45,-11.8
  rectangle: 8.55,-11.3 9.45,-10.7
  rectangle: 8.55,-13.5 9.45,-12.9
  rectangle: -9.45,-13.5 -8.55,-12.9
  rectangle: -9.45,-9.1 -8.55,-8.5
  rectangle: -9.45,-11.3 -8.55,-10.7
  rectangle: -9.45,-10.2 -8.55,-9.6
  rectangle: -9.45,-12.4 -8.55,-11.8
  rectangle: -9.45,-4.7 -8.55,-4.1
  rectangle: -9.45,-6.9 -8.55,-6.3
  rectangle: -9.45,-5.8 -8.55,-5.2
  rectangle: -9.45,-8 -8.55,-7.4
  rectangle: -9.45,-0.3 -8.55,0.3
  rectangle: -9.45,-2.5 -8.55,-1.9
  rectangle: -9.45,-1.4 -8.55,-0.8
  rectangle: -9.45,-3.6 -8.55,-3
  rectangle: -9.45,4.1 -8.55,4.7
  rectangle: -9.45,1.9 -8.55,2.5
  rectangle: -9.45,3 -8.55,3.6
  rectangle: -9.45,0.8 -8.55,1.4
  rectangle: -9.45,8.5 -8.55,9.1
  rectangle: -9.45,6.3 -8.55,6.9
  rectangle: -9.45,7.4 -8.55,8
  rectangle: -9.45,5.2 -8.55,5.8
  rectangle: -9.45,9.6 -8.55,10.2
  rectangle: -9.45,11.8 -8.55,12.4
  rectangle: -9.45,10.7 -8.55,11.3
  rectangle: -9.45,12.9 -8.55,13.5
  rectangle: 9.45,11.7 10.65,12.5
  rectangle: 9.45,10.6 10.65,11.4
  rectangle: 9.45,9.5 10.65,10.3
  rectangle: 9.45,8.4 10.65,9.2
  rectangle: 9.45,7.3 10.65,8.1
  rectangle: 9.45,6.2 10.65,7
  rectangle: 9.45,5.1 10.65,5.9
  rectangle: 9.45,4 10.65,4.8
  rectangle: 9.45,2.9 10.65,3.7
  rectangle: 9.45,1.8 10.65,2.6
  rectangle: 9.45,0.7 10.65,1.5
  rectangle: 9.45,-0.4 10.65,0.4
  rectangle: 9.45,-1.5 10.65,-0.7
  rectangle: 9.45,-2.6 10.65,-1.8
  rectangle: 9.45,-3.7 10.65,-2.9
  rectangle: 9.45,-4.8 10.65,-4
  rectangle: 9.45,-5.9 10.65,-5.1
  rectangle: 9.45,-7 10.65,-6.2
  rectangle: 9.45,-8.1 10.65,-7.3
  rectangle: 9.45,-9.2 10.65,-8.4
  rectangle: 9.45,-10.3 10.65,-9.5
  rectangle: 9.45,-11.4 10.65,-10.6
  rectangle: 9.45,-12.5 10.65,-11.7
  rectangle: 9.45,-13.6 10.65,-12.8
  rectangle: -10.65,-8.1 -9.45,-7.3
  rectangle: -10.65,-9.2 -9.45,-8.4
  rectangle: -10.65,-10.3 -9.45,-9.5
  rectangle: -10.65,-11.4 -9.45,-10.6
  rectangle: -10.65,-12.5 -9.45,-11.7
  rectangle: -10.65,-13.6 -9.45,-12.8
  rectangle: -10.65,-7 -9.45,-6.2
  rectangle: -10.65,-5.9 -9.45,-5.1
  rectangle: -10.65,-4.8 -9.45,-4
  rectangle: -10.65,-3.7 -9.45,-2.9
  rectangle: -10.65,-2.6 -9.45,-1.8
  rectangle: -10.65,-1.5 -9.45,-0.7
  rectangle: -10.65,-0.4 -9.45,0.4
  rectangle: -10.65,0.7 -9.45,1.5
  rectangle: -10.65,1.8 -9.45,2.6
  rectangle: -10.65,2.9 -9.45,3.7
  rectangle: -10.65,4 -9.45,4.8
  rectangle: -10.65,5.1 -9.45,5.9
  rectangle: -10.65,6.2 -9.45,7
  rectangle: -10.65,7.3 -9.45,8.1
  rectangle: -10.65,8.4 -9.45,9.2
  rectangle: -10.65,9.5 -9.45,10.3
  rectangle: -10.65,10.6 -9.45,11.4
  rectangle: -10.65,11.7 -9.45,12.5
  rectangle: 9.45,12.8 10.65,13.6
  rectangle: -10.65,12.8 -9.45,13.6
Mechanical 15:
  lines w0.05: -0.5,0 0.5,0 ; 0,-0.5 0,0.5 ; -10.75,-15.75 -10.75,15.75 10.75,15.75 10.75,-15.75 -10.75,-15.75
  text ".Designator" at 0.1,0.433 h1
3D body: height 3.2, standoff 0.9, extent -8.95,-14.2 8.95,14.25
3D body: height 0.9, standoff 0, extent -9.45,-14.75 9.45,14.75
3D body: height 3.3, standoff 3.2, extent -8.575,-13.825 8.575,13.875

## LILY-W1 [mm] "Host-based Wi-Fi module"
height 4.14
pads (37):
  rect 0.7x1.5 smd paste+0 mask+0.05: 1(-6.195,-4.6) 2(-5.195,-4.6) 3(-4.195,-4.6) 4(-3.195,-4.6) 5(-2.195,-4.6) 6(-1.195,-4.6) 7(-0.195,-4.6) 8(0.805,-4.6) 9(1.805,-4.6) 10(2.805,-4.6) 11(2.805,4.6) 12(1.805,4.6) 13(0.805,4.6) 14(-0.195,4.6) 15(-1.195,4.6) 16(-2.195,4.6) 17(-3.195,4.6) 18(-4.195,4.6) 19(-5.195,4.6) 20(-6.195,4.6)
  rect 1.5x0.7 smd paste+0 mask+0.05: 21(-6.595,2) 22(-6.595,1) 23(-6.595,0) 24(-6.595,-1) 25(-6.595,-2)
  rect 0.7x0.7 smd paste+0 mask+0.05: 26(-2.385,-1.805) 27(-1.305,-1.805) 28(-0.225,-1.805) 29(-2.385,-0.725) 30(-1.305,-0.725) 31(-0.225,-0.725) 32(-2.385,0.355) 33(-1.305,0.355) 34(-0.225,0.355) 35(-2.385,1.435) 36(-1.305,1.435) 37(-0.225,1.435)
Top Overlay:
  circle w0.254: c-6.2,-6 r0.1
  lines w0.15: -6.995,-5 -6.995,-3 ; -6.995,3 -6.995,5 ; 3.505,-5 7.005,-5 7.005,5 3.505,5
Mechanical 13:
  lines w0.1: -6.995,-5 7.005,-5 7.005,5 -6.995,5 -6.995,-5
Mechanical 15:
  lines w0.05: -7.595,-5.6 7.205,-5.6 7.205,5.6 -7.595,5.6 -7.595,-5.6
  lines w0.1: -0.5,0 0,0 ; 0,-0.5 0,0 ; 0,0.5 0,0 ; 0.5,0 0,0
  text ".Designator" at 0.105,0.433 h1
3D body: height 4.14, standoff 0, extent 3.205,-5 7.005,5
3D body: height 2.54, standoff 0.05, extent -6.995,-5 3.205,5